# EAGLE library part FTSH-105-01-L-D-K (library FTSH-105-01-L-D-K)
10 Position, High Reliability Header Strips, 0.050" pitch Source: Datasheet <http://suddendocs.samtec.com/prints/ftsh-1xx-xx-xxx-d-xxx-xx-mkt.pdf>
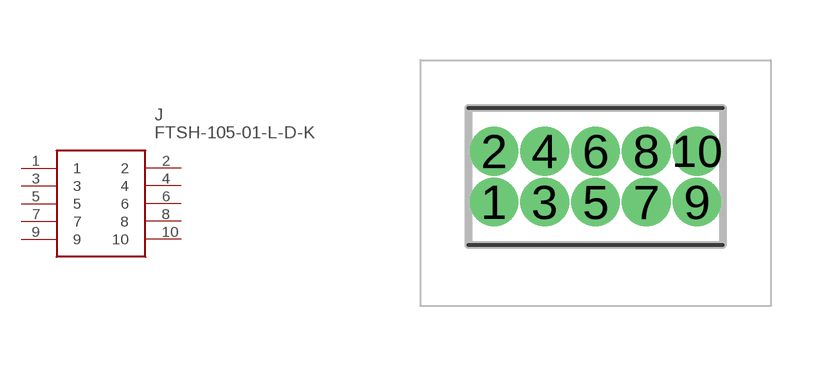
[diagram p0: symbol with the pads of FTSH-105-XX-YYY-D-K; footprint FTSH-105-XX-YYY-D-K]

Designator prefix J

## FTSH-105-01-L-D-K (Description: 10 Position, High Reliability Header Strips, 0.050&quot; pitch; Height: mm; Manufacturer_Name: SAMTEC; Manufacturer_Part_Number: FTSH-105-01-L-D-K; Mouser_Part_Number: 200-FTSH10501LDK; Mouser_Price-Stock: https://www.mouser.co.uk/ProductDetail/Samtec/FTSH-105-01-L-D-K?qs=92ilVni64gxM4uHHuRbswg%3D%3D)  [FTSH-105-XX-YYY-D-K]
1  1
2  2
3  3
4  4
5  5
6  6
7  7
8  8
9  9
10  10

## Footprint FTSH-105-XX-YYY-D-K (pad centres in mm)
FTSH-105-XX-YYY-D-K
drill 0.71 pad 1.15: 1 0,0; 2 0,1.27; 3 1.27,0; 4 1.27,1.27; 5 2.54,0; 6 2.54,1.27; 7 3.81,0; 8 3.81,1.27; 9 5.08,0; 10 5.08,1.27